# Altium footprint library Batterie_footprint.PcbLib: 67 footprints (part 3 of 5)
Each footprint in its own frame and in the unit in brackets; x right, y up, seen from the top. Pads: shape width x height; smd on the part's side, far side on the other; paste and mask are expansions set on the pad; w line width, h text height; cw(c..) or ccw(c..) is an arc to the next point about the centre after c.
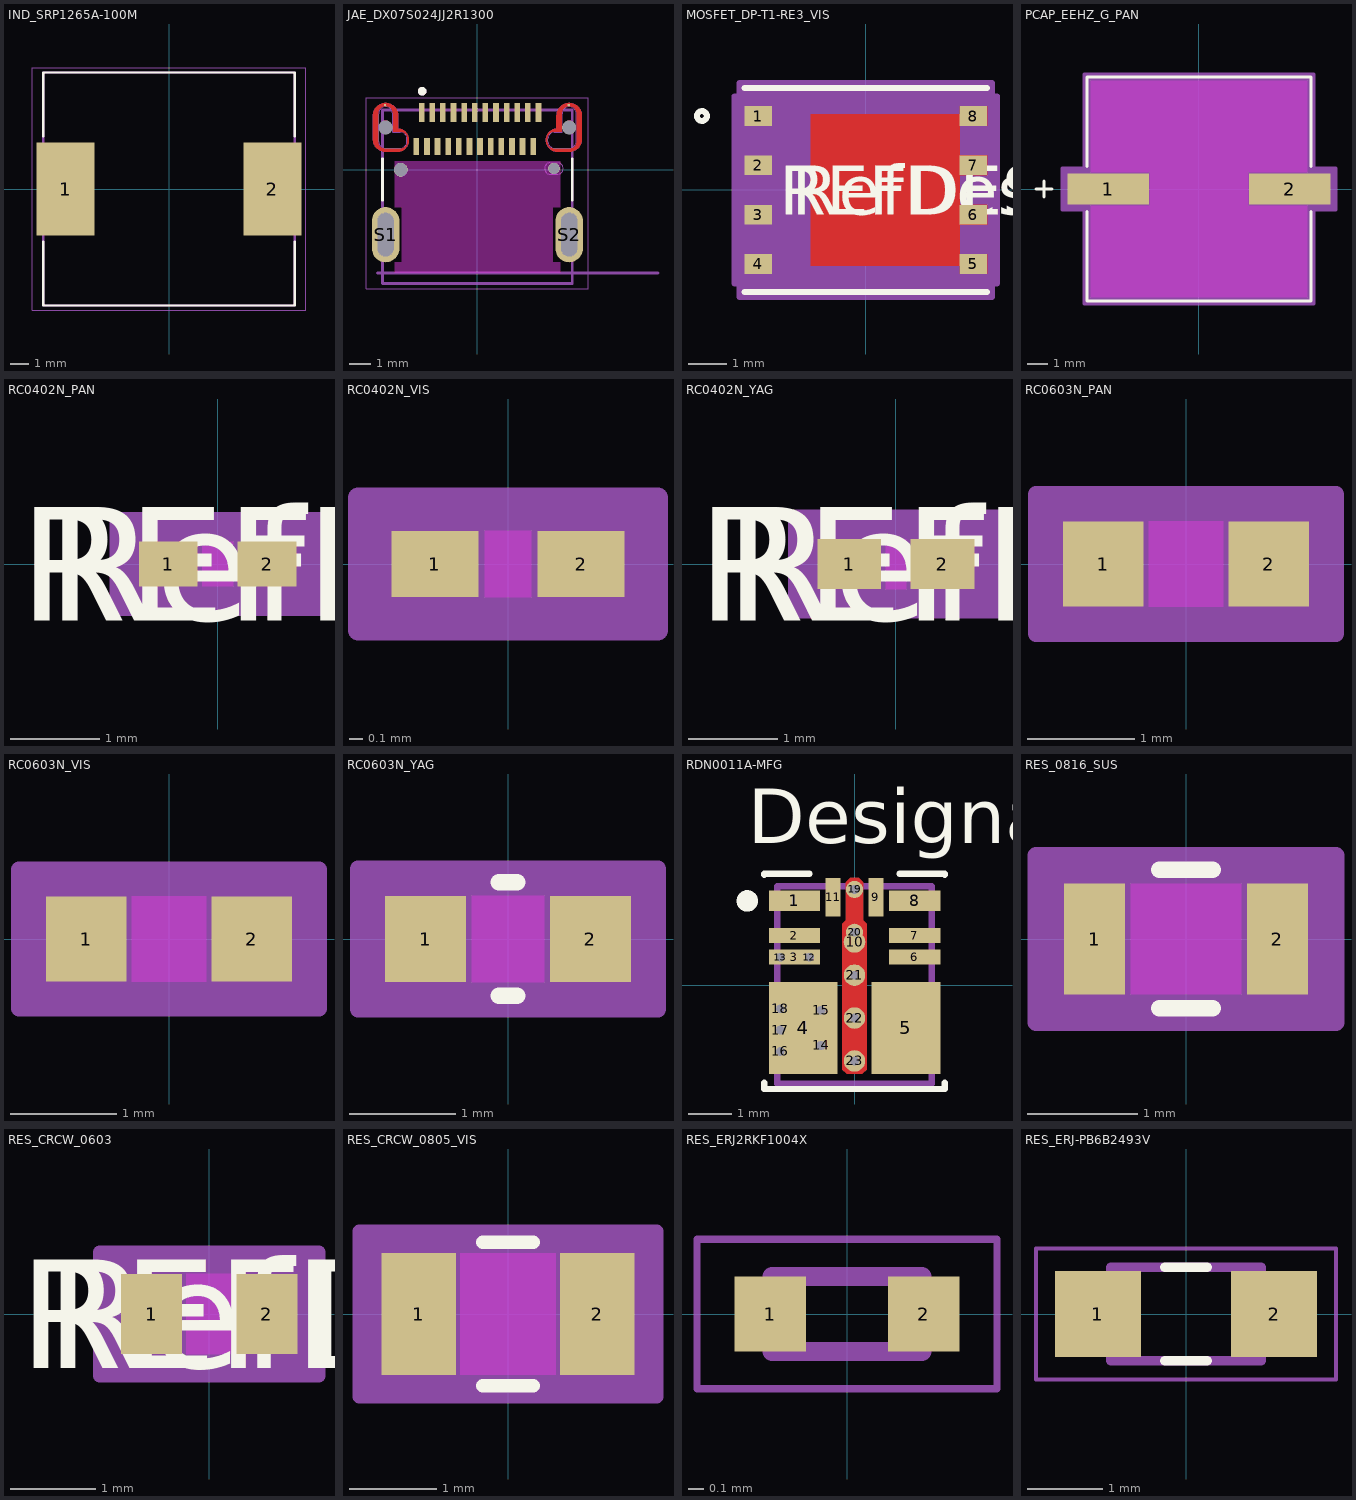
[diagram p2: the footprints below, top view; thin cyan lines are the x and y axes]

## IND_SRP1265A-100M [mm]
height 6.5
pads (2):
  rect 3.1x5 smd: 1(-5.55,0) 2(5.55,0)
Top Overlay:
  lines w0.127: -6.75,-2.82 -6.75,-6.25 6.75,-6.25 6.75,-2.82 ; -6.75,2.82 -6.75,6.25 6.75,6.25 6.75,2.82
Mechanical 13:
  lines w0.127: -6.75,-6.25 -6.75,6.25 6.75,6.25 6.75,-6.25 -6.75,-6.25
Mechanical 15:
  lines w0.05: -7.35,-6.5 7.35,-6.5 7.35,6.5 -7.35,6.5 -7.35,-6.5
3D body "step_temp.STEP": height 6.5, standoff 0, extent -6.75,-6.25 6.75,6.25

## JAE_DX07S024JJ2R1300 [mm]
height 3.29
pads (32):
  rect 0.27x0.9 smd: A1(-2.625,2.7) A2(-2.125,2.7) A3(-1.625,2.7) A4(-1.125,2.7) A5(-0.625,2.7) A6(-0.125,2.7) A7(0.375,2.7) A8(0.875,2.7) A9(1.375,2.7) A10(1.875,2.7) A11(2.375,2.7) A12(2.875,2.7)
  rect 0.27x0.8 smd: B1(2.625,1.1) B2(2.125,1.1) B3(1.625,1.1) B4(1.125,1.1) B5(0.625,1.1) B6(0.125,1.1) B7(-0.375,1.1) B8(-0.875,1.1) B9(-1.375,1.1) B10(-1.875,1.1) B11(-2.375,1.1) B12(-2.875,1.1)
  oval 1.3x2.6 hole 0.75 slot 2.05 at 90 deg: S1(-4.32,-3.05) S2(4.32,-3.05)
  rect 0.1x0.1 smd paste-1 mask+0: S3(-4.35,3.05) S4(4.3,3.05)
  round 0.65 hole 0.65 unplated: ""(-4.32,2) ""(4.32,2)
  round 0.63 hole 0.63 unplated: ""(-3.6,0)
  round 0.53 hole 0.53 unplated: ""(3.6,0.065)
Top Layer:
  region: 154 vertices and 1 holes, not listed, extent -4.92,0.85 -3.22,3.15
  region: 154 vertices and 1 holes, not listed, extent 3.22,0.85 4.92,3.15
Bottom Layer:
  region: 154 vertices and 1 holes, not listed, extent -4.92,0.85 -3.22,3.15
  region: 154 vertices and 1 holes, not listed, extent 3.22,0.85 4.92,3.15
Top Overlay:
  circle w0.2: c-2.6,3.7 r0.1
  lines w0.127: -4.47,-1.43 -4.47,0.53 ; 4.47,-1.43 4.47,0.53
Top Paste:
  drawing of 2 lines, arcs and shapes, not listed
Bottom Paste:
  drawing of 2 lines, arcs and shapes, not listed
Top Solder:
  drawing of 2 lines, arcs and shapes, not listed
Bottom Solder:
  drawing of 2 lines, arcs and shapes, not listed
Keep-Out Layer:
  region: 3.9,-1.75 3.55,-1.75 3.55,-4.35 3.9,-4.35 3.9,-4.85 -3.9,-4.85 -3.9,-4.35 -3.55,-4.35 -3.55,-1.75 -3.9,-1.75 -3.9,0.4 3.9,0.4
Mechanical 1:
  lines w0: -4.645,1.325 ccw(c-4.345,1.325) -4.345,1.025 -3.62,1.025 ccw(c-3.62,1.325) -3.32,1.325 -3.32,1.475 ccw(c-3.62,1.475) -3.62,1.775 -3.995,1.775 -3.995,2.65 ccw(c-4.32,2.65) -4.32,2.975 ccw(c-4.32,2.65) -4.645,2.65 -4.645,1.325 ; 3.16,0.065 ccw(c3.425,0.065) 3.425,-0.2 3.775,-0.2 ccw(c3.775,0.065) 4.04,0.065 ccw(c3.775,0.065) 3.775,0.33 3.425,0.33 ccw(c3.425,0.065) 3.16,0.065 ; 3.32,1.325 ccw(c3.62,1.325) 3.62,1.025 4.345,1.025 ccw(c4.345,1.325) 4.645,1.325 4.645,2.65 ccw(c4.32,2.65) 4.32,2.975 ccw(c4.32,2.65) 3.995,2.65 3.995,1.775 3.62,1.775 ccw(c3.62,1.475) 3.32,1.475 3.32,1.325
Mechanical 13:
  circle w0.2: c-2.6,3.7 r0.1
  lines w0.127: -4.7,-4.85 8.5,-4.85 ; -4.47,-5.35 -4.47,2.82 4.47,2.82 4.47,-5.35 -4.47,-5.35
  text "PCB EDGE" at 5.5,-4.6 h0.41
Mechanical 15:
  lines w0.05: -5.225,-5.6 5.225,-5.6 5.225,3.4 -5.225,3.4 -5.225,-5.6
3D body "DX07S024JJ2R1300.step": height 3.14, standoff -0.6, extent -4.47,-5.27 4.47,2.9

## MOSFET_DP-T1-RE3_VIS [mil]
pads (8):
  rect 28x20 smd paste-10 mask+0: 1(-109.06,75) 2(-109.06,25) 3(-109.06,-25) 4(-109.06,-75) 5(109.06,-75) 6(109.06,-25) 7(109.06,25) 8(109.06,75)
Top Layer:
  region: -55.95,77 95.06,77 95.06,85 123.06,85 123.06,65 95.06,65 95.06,35 123.06,35 123.06,15 95.06,15 95.06,-15 123.06,-15 123.06,-35 95.06,-35 95.06,-65 123.06,-65 123.06,-85 95.06,-85 95.06,-77 -55.95,-77
  region: 0,-77
  region: 0,77
Top Overlay:
  circle w6: c-166.06,75 r5
  lines w6: -123,-103.5 123,-103.5 ; -123,103.5 123,103.5
  text "REFDES" at -87.5,-25 h50
  text "RefDes" at -75,-25 h50
Top Paste:
  region: -55.95,-77 -55.95,77 95.06,77 95.06,85 123.06,85 123.06,65 95.06,65 95.06,35 123.06,35 123.06,15 95.06,15 95.06,-15 123.06,-15 123.06,-35 95.06,-35 95.06,-65 123.06,-65 123.06,-85 95.06,-85 95.06,-77
  region: 71.56,-29.6 29.1,-29.6 29.1,-73.06 71.56,-73.06
  region: 71.56,21.73 29.1,21.73 29.1,-21.73 71.56,-21.73
  region: 71.56,73.06 29.1,73.06 29.1,29.6 71.56,29.6
  region: 21.23,-29.6 -21.23,-29.6 -21.23,-73.06 21.23,-73.06
  region: 21.23,21.73 -21.23,21.73 -21.23,-21.73 21.23,-21.73
  region: 21.23,73.06 -21.23,73.06 -21.23,29.6 21.23,29.6
  region: -29.1,-29.6 -71.56,-29.6 -71.56,-73.06 -29.1,-73.06
  region: -29.1,21.73 -71.56,21.73 -71.56,-21.73 -29.1,-21.73
  region: -29.1,73.06 -71.56,73.06 -71.56,29.6 -29.1,29.6
Top Solder:
  region: -55.95,-77 -55.95,77 95.06,77 95.06,85 123.06,85 123.06,65 95.06,65 95.06,35 123.06,35 123.06,15 95.06,15 95.06,-15 123.06,-15 123.06,-35 95.06,-35 95.06,-65 123.06,-65 123.06,-85 95.06,-85 95.06,-77
  region: 0,-77
  region: 0,77
Mechanical 13:
  circle w0: c-95.06,75 r3
  lines w0: -12,98.5 ccw(c0,98.5) 12,98.5
  lines w1: -118,-98.5 -118,98.5 118,98.5 118,-98.5 -118,-98.5
  text "RefDes2" at -87.5,-25 h50
Mechanical 15:
  region: -128,-95 -133.06,-95 -133.06,95 -128,95 -128,108.5 128,108.5 128,95 133.06,95 133.06,-95 128,-95 128,-108.5 -128,-108.5
  lines w6: -133.06,-95 -128,-95 -128,-108.5 128,-108.5 128,-95 133.06,-95 133.06,95 128,95 128,108.5 -128,108.5 -128,95 -133.06,95 -133.06,-95

## PCAP_EEHZ_G_PAN [mil]
pads (2):
  rect 154x59 smd paste+0 mask+0: 1(-171.5,0) 2(171.5,0)
Top Layer keep-out:
  region: -204.5,-204.5 -204.5,-31.5 204.5,-31.5 204.5,-204.5
  region: -204.5,31.5 -204.5,204.5 204.5,204.5 204.5,31.5
  region: -92.5,-31.5 -92.5,31.5 92.5,31.5 92.5,-31.5
Top Overlay:
  lines w6: -307.5,0 -277.5,0 ; -292.5,-15 -292.5,15 ; -211.5,-42.6 -211.5,-211.5 211.5,-211.5 211.5,-42.6 ; -211.5,42.6 -211.5,211.5 211.5,211.5 211.5,42.6
  text ".Designator" at -137.5,-25 h50
Keep-Out Layer:
  region: -92.5,-31.5 -92.5,31.5 92.5,31.5 92.5,-31.5
Mechanical 13:
  lines w1: -307.5,0 -277.5,0 ; -292.5,-15 -292.5,15 ; -206.5,-103.25 -103.25,-206.5 ; -206.5,103.25 -103.25,206.5 ; -206.5,-206.5 -206.5,206.5 206.5,206.5 206.5,-206.5 -206.5,-206.5
  text ".Designator" at -137.5,-25 h50
Mechanical 15:
  region: -216.5,-39.5 -258.5,-39.5 -258.5,39.5 -216.5,39.5 -216.5,216.5 216.5,216.5 216.5,39.5 258.5,39.5 258.5,-39.5 216.5,-39.5 216.5,-216.5 -216.5,-216.5
  lines w6: -258.5,-39.5 -216.5,-39.5 -216.5,-216.5 216.5,-216.5 216.5,-39.5 258.5,-39.5 258.5,39.5 216.5,39.5 216.5,216.5 -216.5,216.5 -216.5,39.5 -258.5,39.5 -258.5,-39.5
3D body "PCAP_EEHZ_G_PAN.step": height 415.12, standoff 0, extent -228.5,-206.5 228.5,206.5

## RC0402N_PAN [mm]
pads (2):
  rect 0.656x0.5 smd paste+0 mask+0: 1(-0.553,0) 2(0.553,0)
Top Layer keep-out:
  region: -0.174,-0.199 -0.174,0.199 0.174,0.199 0.174,-0.199
Top Overlay:
  text "REFDES" at -2.222,-0.635 h1.27
  text "RefDes" at -1.905,-0.635 h1.27
Keep-Out Layer:
  region: -0.174,-0.25 -0.174,0.25 0.174,0.25 0.174,-0.25
Mechanical 13:
  lines w0.025: -0.525,-0.25 -0.525,0.25 ; -0.525,-0.25 0.525,-0.25 ; -0.525,-0.25 -0.225,-0.25 -0.225,0.25 -0.525,0.25 ; -0.525,-0.25 -0.525,0.25 ; -0.525,0.25 0.525,0.25 ; 0.525,-0.25 0.525,0.25 ; 0.525,-0.25 0.525,0.25 ; 0.525,-0.25 0.225,-0.25 0.225,0.25 0.525,0.25
  text "RefDes2" at -2.222,-0.635 h1.27
Mechanical 15:
  region: 1.135,-0.504 -1.135,-0.504 -1.135,0.504 1.135,0.504
  lines w0.152: -1.135,-0.504 1.135,-0.504 1.135,0.504 -1.135,0.504 -1.135,-0.504
3D body "RC0402N_PAN.step": height 0.71, standoff 0, extent -0.525,-0.25 0.525,0.25

## RC0402N_VIS [mm]
pads (2):
  rect 0.656x0.5 smd paste+0 mask+0: 1(-0.553,0) 2(0.553,0)
Top Layer keep-out:
  region: -0.174,-0.199 -0.174,0.199 0.174,0.199 0.174,-0.199
Top Overlay:
  text ".Designator" at -3.492,-0.635 h1.27
Keep-Out Layer:
  region: -0.174,-0.25 -0.174,0.25 0.174,0.25 0.174,-0.25
Mechanical 13:
  lines w0.025: -0.525,-0.25 -0.525,0.25 ; -0.525,-0.25 0.525,-0.25 ; -0.525,-0.25 -0.225,-0.25 -0.225,0.25 -0.525,0.25 ; -0.525,-0.25 -0.525,0.25 ; -0.525,0.25 0.525,0.25 ; 0.525,-0.25 0.525,0.25 ; 0.525,-0.25 0.525,0.25 ; 0.525,-0.25 0.225,-0.25 0.225,0.25 0.525,0.25
  text ".Designator" at -3.492,-0.635 h1.27
Mechanical 15:
  region: 1.135,-0.504 -1.135,-0.504 -1.135,0.504 1.135,0.504
  lines w0.152: -1.135,-0.504 1.135,-0.504 1.135,0.504 -1.135,0.504 -1.135,-0.504
3D body "RC0402N_VIS.step": height 0.71, standoff 0, extent -0.525,-0.25 0.525,0.25

## RC0402N_YAG [mil]
pads (2):
  rect 28x22 smd paste+0 mask+0: 1(-20.5,0) 2(20.5,0)
Top Layer keep-out:
  region: -4.5,-9 -4.5,9 4.5,9 4.5,-9
Top Overlay:
  text "REFDES" at -87.5,-25 h50
  text "RefDes" at -75,-25 h50
Keep-Out Layer:
  region: -4.5,-11 -4.5,11 4.5,11 4.5,-11
Mechanical 13:
  lines w1: -20.5,-11 -20.5,11 ; -20.5,-11 20.5,-11 ; -20.5,-11 -6.5,-11 -6.5,11 -20.5,11 ; -20.5,-11 -20.5,11 ; -20.5,11 20.5,11 ; 20.5,-11 20.5,11 ; 20.5,-11 20.5,11 ; 20.5,-11 6.5,-11 6.5,11 20.5,11
  text "RefDes2" at -87.5,-25 h50
Mechanical 15:
  region: 44.5,-21 -44.5,-21 -44.5,21 44.5,21
  lines w6: -44.5,-21 44.5,-21 44.5,21 -44.5,21 -44.5,-21
3D body "RC0402N_YAG.step": height 15.98, standoff 0, extent -20.51,-10.98 20.51,10.98

## RC0603N_PAN [mm]
pads (2):
  rect 0.75x0.8 smd paste+0 mask+0: 1(-0.775,0) 2(0.775,0)
Top Layer keep-out:
  region: -0.349,-0.349 -0.349,0.349 0.349,0.349 0.349,-0.349
Top Overlay:
  text ".Designator" at -3.492,-0.635 h1.27
Keep-Out Layer:
  region: -0.349,-0.4 -0.349,0.4 0.349,0.4 0.349,-0.4
Mechanical 13:
  lines w0.025: -0.8,-0.4 -0.8,0.4 ; -0.8,-0.4 0.8,-0.4 ; -0.8,-0.4 -0.4,-0.4 -0.4,0.4 -0.8,0.4 ; -0.8,-0.4 -0.8,0.4 ; -0.8,0.4 0.8,0.4 ; 0.8,-0.4 0.8,0.4 ; 0.8,-0.4 0.8,0.4 ; 0.8,-0.4 0.4,-0.4 0.4,0.4 0.8,0.4
  text ".Designator" at -3.492,-0.635 h1.27
Mechanical 15:
  region: 1.404,-0.654 -1.404,-0.654 -1.404,0.654 1.404,0.654
  lines w0.152: -1.404,-0.654 1.404,-0.654 1.404,0.654 -1.404,0.654 -1.404,-0.654
3D body "RC0603N_PAN.step": height 0.71, standoff 0, extent -0.8,-0.4 0.8,0.4

## RC0603N_VIS [mm]
pads (2):
  rect 0.756x0.8 smd paste+0 mask+0: 1(-0.778,0) 2(0.778,0)
Top Layer keep-out:
  region: -0.349,-0.349 -0.349,0.349 0.349,0.349 0.349,-0.349
Top Overlay:
  text ".Designator" at -3.492,-0.635 h1.27
Keep-Out Layer:
  region: -0.349,-0.4 -0.349,0.4 0.349,0.4 0.349,-0.4
Mechanical 13:
  lines w0.025: -0.8,-0.4 -0.8,0.4 ; -0.8,-0.4 0.8,-0.4 ; -0.8,-0.4 -0.4,-0.4 -0.4,0.4 -0.8,0.4 ; -0.8,-0.4 -0.8,0.4 ; -0.8,0.4 0.8,0.4 ; 0.8,-0.4 0.8,0.4 ; 0.8,-0.4 0.8,0.4 ; 0.8,-0.4 0.4,-0.4 0.4,0.4 0.8,0.4
  text ".Designator" at -3.492,-0.635 h1.27
Mechanical 15:
  region: 1.41,-0.654 -1.41,-0.654 -1.41,0.654 1.41,0.654
  lines w0.152: -1.41,-0.654 1.41,-0.654 1.41,0.654 -1.41,0.654 -1.41,-0.654
3D body "RC0603N_VIS.step": height 0.71, standoff 0, extent -0.8,-0.4 0.8,0.4

## RC0603N_YAG [mil]
pads (2):
  rect 30x32 smd paste+0 mask+0: 1(-30.5,0) 2(30.5,0)
Top Layer keep-out:
  region: -13.5,-14 -13.5,14 13.5,14 13.5,-14
Top Overlay:
  lines w6: -3.39,-21 3.39,-21 ; -3.39,21 3.39,21
  text ".Designator" at -137.5,-25 h50
Keep-Out Layer:
  region: -13.5,-16 -13.5,16 13.5,16 13.5,-16
Mechanical 13:
  lines w1: -31.5,-16 -31.5,16 ; -31.5,-16 31.5,-16 ; -31.5,-16 -15.5,-16 -15.5,16 -31.5,16 ; -31.5,-16 -31.5,16 ; -31.5,16 31.5,16 ; 31.5,-16 31.5,16 ; 31.5,-16 31.5,16 ; 31.5,-16 15.5,-16 15.5,16 31.5,16
  text ".Designator" at -137.5,-25 h50
Mechanical 15:
  region: 55.5,-26 -55.5,-26 -55.5,26 55.5,26
  lines w6: -55.5,-26 55.5,-26 55.5,26 -55.5,26 -55.5,-26
3D body "RC0603N_YAG.step": height 27.99, standoff 0, extent -31.5,-15.98 31.5,15.98

## RDN0011A-MFG [mm]
pads (23):
  rect 1.2x0.475 smd paste-0.587 mask-0.584: 1(-1.4,1.962) 8(1.4,1.962)
  rect 1.2x0.35 smd paste-0.587 mask-0.584: 2(-1.4,1.15) 3(-1.4,0.65) 6(1.4,0.65) 7(1.4,1.15)
  rect 1.6x2.15 smd paste-1.062 mask-1.067: 4(-1.2,-1) 5(1.2,-1)
  rect 0.35x0.9 smd paste-0.437 mask-0.432: 9(0.5,2.05) 11(-0.5,2.05)
  round 0.504 smd paste-0.239 mask-0.241: 10(0,1.005)
  round 0.35 hole 0.203 paste-2539.97 mask-0.165: 12(-1.05,0.65) 13(-1.73,0.65)
  round 0.5 hole 0.203 paste-2539.97 mask-0.241: 14(-0.78,-1.41) 15(-0.78,-0.59) 16(-1.73,-1.55) 17(-1.73,-1.05) 18(-1.73,-0.55) 21(0,0.23) 22(0,-0.77) 23(0,-1.77)
  round 0.4 hole 0.203 paste-2539.97 mask-0.191: 19(0,2.23) 20(0,1.23)
Top Layer:
  region: -0.2,1.515 -0.2,2.4 -0.1,2.5 0.1,2.5 0.2,2.4 0.2,1.515 0.24,1.475 0.28,1.435 0.28,-1.975 0.18,-2.075 -0.18,-2.075 -0.28,-1.975 -0.28,1.435 -0.24,1.475
Top Overlay:
  circle w0.25: c-2.5,1.962 r0.125
  lines w0.15: -2.1,-2.275 -2.1,-2.425 2.1,-2.425 2.1,-2.275 ; -2.1,2.575 -2.1,2.6 -1.05,2.6 ; 1.05,2.6 2.1,2.6 2.1,2.575
  text "Designator402" at -2.489,3.302 h1.27
  text ".Designator" at -3.492,-0.635 h1.27
Top Paste:
  drawing of 23 lines, arcs and shapes, not listed
Top Solder:
  drawing of 11 lines, arcs and shapes, not listed
Mechanical 13:
  lines w0.15: -1.8,-2.3 1.8,-2.3 1.8,2.3 -1.8,2.3 -1.8,-2.3
  text ".Designator" at -3.492,-0.635 h1.27

## RES_0816_SUS [mm]
pads (2):
  rect 0.553x1 smd paste+0 mask+0: 1(-0.827,0) 2(0.827,0)
Top Layer keep-out:
  region: -0.499,-0.449 -0.499,0.449 0.499,0.449 0.499,-0.449
Top Overlay:
  lines w0.152: -0.242,-0.627 0.242,-0.627 ; -0.242,0.627 0.242,0.627
  text ".Designator" at -3.492,-0.635 h1.27
Keep-Out Layer:
  region: -0.499,-0.5 -0.499,0.5 0.499,0.5 0.499,-0.5
Mechanical 13:
  lines w0.025: -0.9,-0.5 -0.9,0.5 ; -0.9,-0.5 -0.55,-0.5 -0.55,0.5 -0.9,0.5 ; -0.9,-0.5 0.9,-0.5 ; -0.9,-0.5 -0.9,0.5 ; -0.9,0.5 0.9,0.5 ; 0.9,-0.5 0.55,-0.5 0.55,0.5 0.9,0.5 ; 0.9,-0.5 0.9,0.5 ; 0.9,-0.5 0.9,0.5
  text ".Designator" at -3.492,-0.635 h1.27
Mechanical 15:
  region: 1.357,-0.754 -1.357,-0.754 -1.357,0.754 1.357,0.754
  lines w0.152: -1.357,-0.754 -1.357,0.754 1.357,0.754 1.357,-0.754 -1.357,-0.754
3D body "RES_0816_SUS.step": height 0.55, standoff 0, extent -0.9,-0.5 0.9,0.5

## RES_CRCW_0603 [mil]
pads (2):
  rect 28x37 smd paste-18.5 mask-18.5: 1(-26.5,0) 2(26.5,0)
Top Layer keep-out:
  region: -10.5,-16.5 -10.5,16.5 10.5,16.5 10.5,-16.5
Top Overlay:
  text "RefDes" at -75,-25 h50
  text "REFDES" at -87.5,-25 h50
Keep-Out Layer:
  region: -10.5,-18.5 -10.5,18.5 10.5,18.5 10.5,-18.5
Mechanical 13:
  lines w1: -32.5,-18.5 -32.5,18.5 ; -32.5,-18.5 -12.5,-18.5 -12.5,18.5 -32.5,18.5 ; -32.5,-18.5 32.5,-18.5 ; -32.5,-18.5 -32.5,18.5 ; -32.5,18.5 32.5,18.5 ; 32.5,-18.5 12.5,-18.5 12.5,18.5 32.5,18.5 ; 32.5,-18.5 32.5,18.5 ; 32.5,-18.5 32.5,18.5
  text "RefDes2" at -87.5,-25 h50
Mechanical 15:
  region: 50.5,-28.5 -50.5,-28.5 -50.5,28.5 50.5,28.5
  lines w6: -50.5,-28.5 -50.5,28.5 50.5,28.5 50.5,-28.5 -50.5,-28.5
3D body "RES_CRCW_0603.step": height 20, standoff 0, extent -32.52,-18.5 32.52,18.5

## RES_CRCW_0805_VIS [mil]
pads (2):
  rect 33.78x55 smd paste+0 mask+0: 1(-40.39,0) 2(40.39,0)
Top Layer keep-out:
  region: -21.5,-25.5 -21.5,25.5 21.5,25.5 21.5,-25.5
Top Overlay:
  lines w6: -11.39,-32.5 11.39,-32.5 ; -11.39,32.5 11.39,32.5
  text ".Designator" at -137.5,-25 h50
Keep-Out Layer:
  region: -21.5,-27.5 -21.5,27.5 21.5,27.5 21.5,-27.5
Mechanical 13:
  lines w1: -43.5,-27.5 -43.5,27.5 ; -43.5,-27.5 43.5,-27.5 ; -43.5,-27.5 -23.5,-27.5 -23.5,27.5 -43.5,27.5 ; -43.5,-27.5 -43.5,27.5 ; -43.5,27.5 43.5,27.5 ; 43.5,-27.5 43.5,27.5 ; 43.5,-27.5 43.5,27.5 ; 43.5,-27.5 23.5,-27.5 23.5,27.5 43.5,27.5
  text ".Designator" at -137.5,-25 h50
Mechanical 15:
  region: 67.28,-37.5 -67.28,-37.5 -67.28,37.5 67.28,37.5
  lines w6: -67.28,-37.5 67.28,-37.5 67.28,37.5 -67.28,37.5 -67.28,-37.5
3D body "RES_CRCW_0805_VIS.step": height 20, standoff 0, extent -43.5,-27.48 43.5,27.48

## RES_ERJ2RKF1004X [mm]
height 0.35
pads (2):
  rect 0.475x0.5 smd: 1(-0.512,0) 2(0.512,0)
Mechanical 13:
  lines w0.127: -0.5,-0.25 -0.5,0.25 0.5,0.25 0.5,-0.25 -0.5,-0.25
Mechanical 15:
  lines w0.05: -1,-0.5 -1,0.5 1,0.5 1,-0.5 -1,-0.5
3D body "step_temp.STEP": height 0.35, standoff 0, extent -0.5,-0.25 0.5,0.25

## RES_ERJ-PB6B2493V [mm]
height 0.55
pads (2):
  rect 1.15x1.15 smd: 1(-1.175,0) 2(1.175,0)
Top Overlay:
  lines w0.127: -0.28,-0.625 0.28,-0.625 ; -0.28,0.625 0.28,0.625
Mechanical 13:
  lines w0.127: -1,-0.625 1,-0.625 1,0.625 -1,0.625 -1,-0.625
Mechanical 15:
  lines w0.05: -2,-0.875 2,-0.875 2,0.875 -2,0.875 -2,-0.875